# Altium footprint library PcbLib1.PcbLib: 5 footprints
Each footprint in its own frame and in the unit in brackets; x right, y up, seen from the top. Pads: shape width x height; smd on the part's side, far side on the other; paste and mask are expansions set on the pad; w line width, h text height; cw(c..) or ccw(c..) is an arc to the next point about the centre after c.
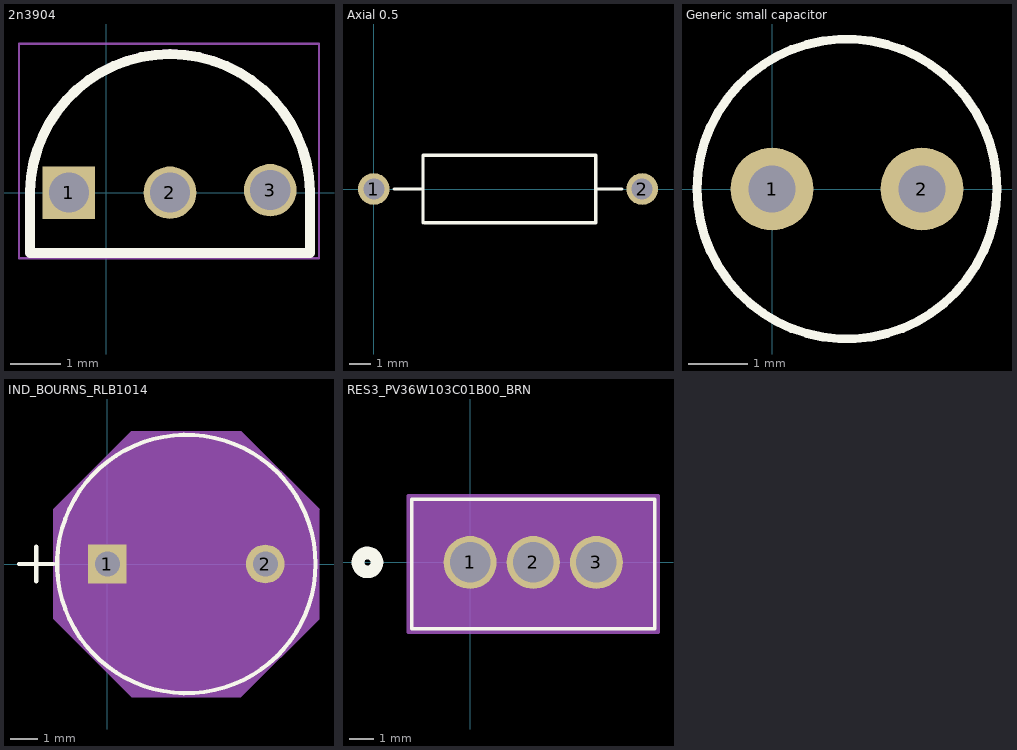
[diagram p0: the footprints below, top view; thin cyan lines are the x and y axes]

## 2n3904 [mm] "TO, 3-Leads, Body Dia 4.79mm, Pitch 1.27mm"
height 5.33
pads (3):
  rect 1.05x1.05 hole 0.8 mask+0.05: 1(-0.75,0)
  round 1.05 hole 0.8 mask+0.05: 2(1.27,0) 3(3.275,0.05)
Top Overlay:
  lines w0.2: -1.53,-1.21 -1.53,0.025 ; -1.53,0.023 cw(c1.27,-0.03) 4.069,0.023 ; -1.5,-1.21 4.05,-1.21 ; 4.07,-1.21 4.07,-0.025
Top Courtyard:
  lines w0.05: -1.75,-1.31 -1.75,2.975 4.25,2.975 4.25,-1.31 -1.75,-1.31
Top 3D Body:
  lines w0.1: -1.53,0.015 cw(c1.27,0.015) 4.07,0.015 ; -1.11,-1.21 3.65,-1.21

## Axial 0.5 [mm]
pads (2):
  round 1.5 hole 1: 1(0,0) 2(12.7,0)
Top Overlay:
  lines w0.15: 0.95,0 2.325,0 ; 2.325,-1.6 2.325,0 ; 2.4,-1.6 10.5,-1.6 10.5,1.6 2.325,1.6 2.325,0 ; 10.525,0 11.75,0

## Generic small capacitor [mm]
pads (2):
  round 1.4 / inner round 1.4 / far side round 1.2 hole 0.8: 1(0,0) 2(2.54,0)
Top Overlay:
  circle w0.15: c1.27,0 r2.54

## IND_BOURNS_RLB1014 [mil]
pads (2):
  rect 56x56 hole 36 paste-99999 mask+0: 1(0,0)
  round 56 hole 36 paste-99999 mask+0: 2(228,0)
Top Overlay:
  circle w6: c114,0 r186.5
  lines w6: -127.5,0 -77.5,0 ; -102.5,-25 -102.5,25
  text ".Designator" at -23.62,212.6 h50
Mechanical 13:
  circle w1: c114,0 r181.5
  lines w1: -127.5,0 -77.5,0 ; -102.5,-25 -102.5,25
Mechanical 15:
  region: -77.5,78.85 35.15,191.5 192.85,191.5 305.5,78.85 305.5,-78.85 192.85,-191.5 35.15,-191.5 -77.5,-78.85
  lines w1: -77.5,-78.85 35.15,-191.5 192.85,-191.5 305.5,-78.85 305.5,78.85 192.85,191.5 35.15,191.5 -77.5,78.85 -77.5,-78.85
3D body "IND_BOURNS_RLB1014.step": height 511.61, standoff -177.99, extent -67.74,-181.38 295.03,181.38

## RES3_PV36W103C01B00_BRN [mil]
pads (3):
  round 84 / inner round 60 / far side round 84 hole 64 paste-99999 mask+0: 1(0,0) 2(100,0) 3(200,0)
Top Overlay:
  circle w20: c-162.5,0 r15
  lines w6: -92.5,-105 292.5,-105 292.5,100 -92.5,100 -92.5,-105
  text ".Designator" at -39.37,125.98 h50
Bottom Overlay:
  circle w20: c-162.5,0 r15
Mechanical 13:
  circle w20: c0,75 r15
  lines w1: -87.5,-100 287.5,-100 287.5,95 -87.5,95 -87.5,-100
Mechanical 15:
  region: 297.5,105 -97.5,105 -97.5,-110 297.5,-110
  lines w6: -97.5,-110 -97.5,105 297.5,105 297.5,-110 -97.5,-110